# Altium footprint library FootPrintLib_10.PcbLib: 270 footprints (part 4 of 17)
Each footprint in its own frame and in the unit in brackets; x right, y up, seen from the top. Pads: shape width x height; smd on the part's side, far side on the other; paste and mask are expansions set on the pad; w line width, h text height; cw(c..) or ccw(c..) is an arc to the next point about the centre after c.
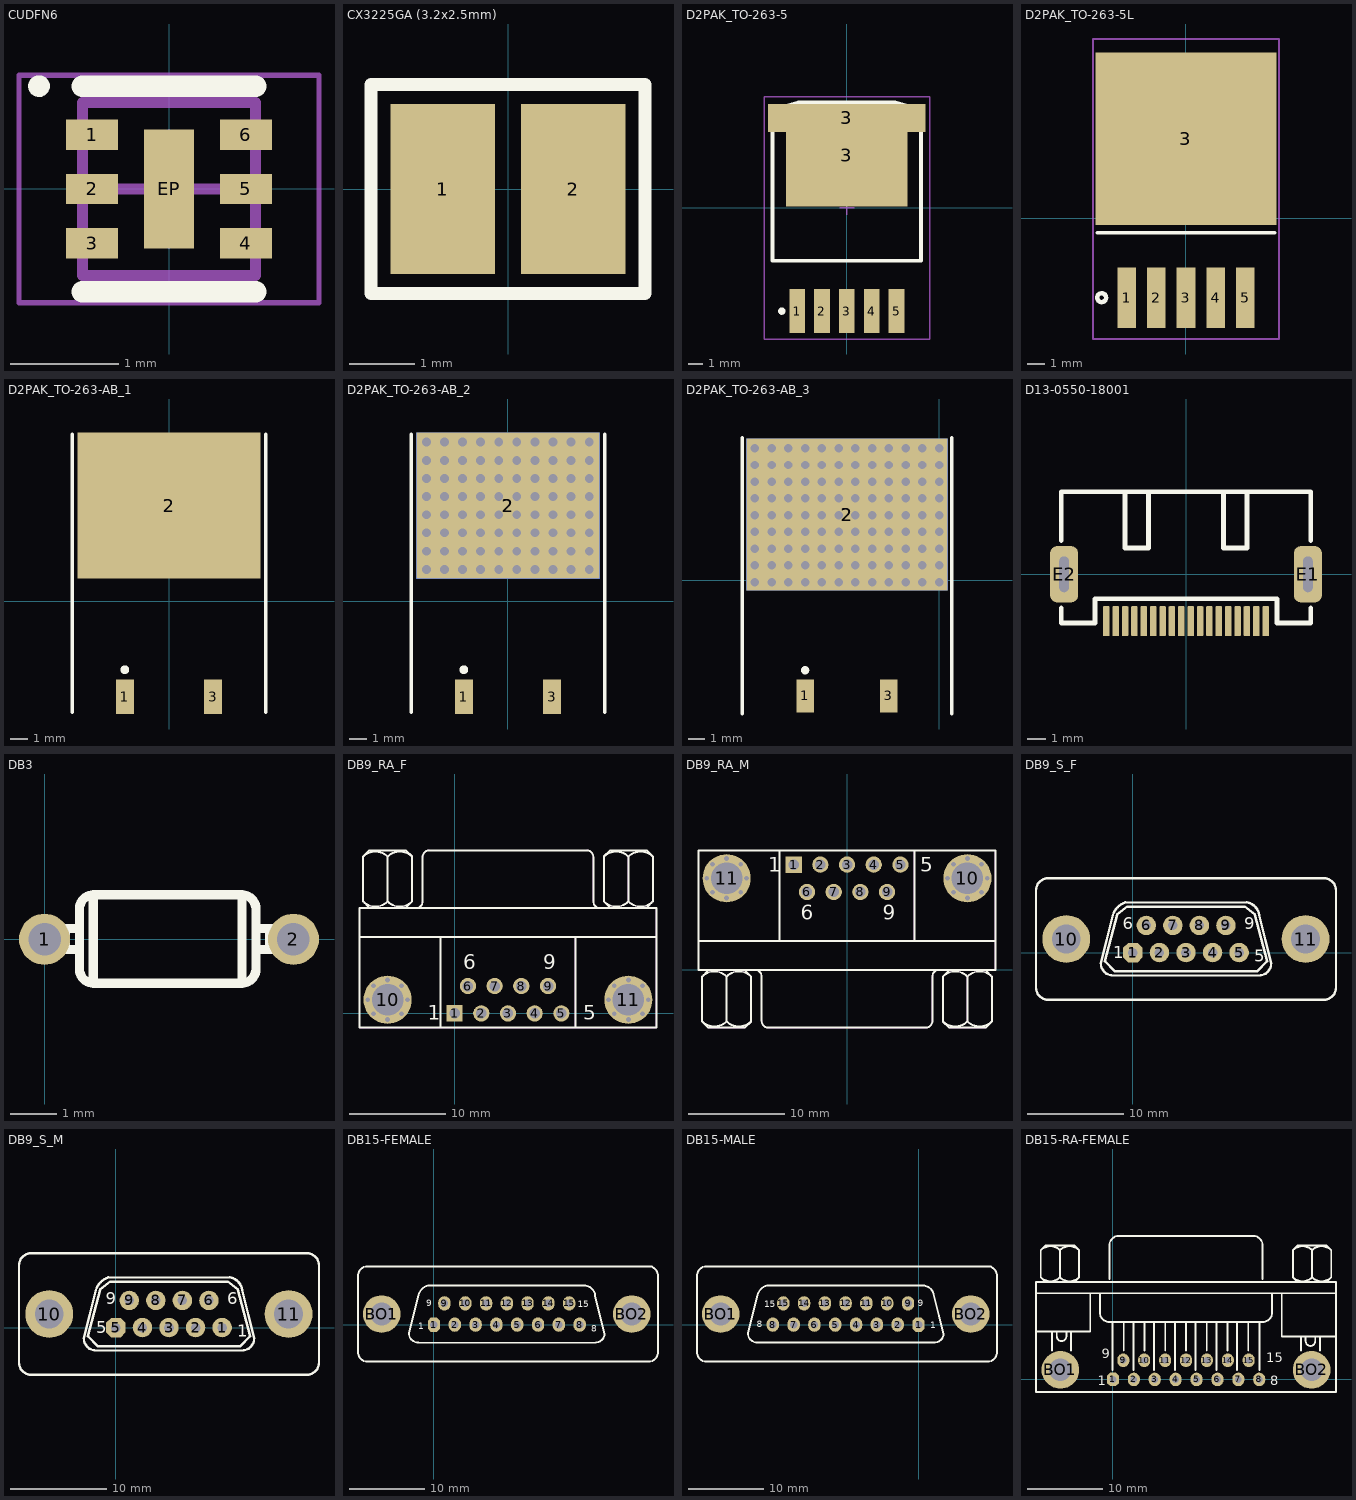
[diagram p3: the footprints below, top view; thin cyan lines are the x and y axes]

## CUDFN6 [mm] "CUDFN6, 1.6x1.6mm, 0.5P"
height 0.65
pads (7):
  rect 0.48x0.28 smd mask+0.03: 1(-0.71,0.5) 2(-0.71,0) 3(-0.71,-0.5) 4(0.71,-0.5) 5(0.71,0) 6(0.71,0.5)
  rect 0.46x1.1 smd: EP(0,0)
Top Overlay:
  circle w0.1: c-1.2,0.95 r0.05
  lines w0.2: -0.8,-0.95 0.8,-0.95 ; -0.8,0.95 0.8,0.95
Mechanical 13:
  lines w0.1: -0.8,-0.8 0.8,-0.8 0.8,0.8 -0.8,0.8 -0.8,-0.8
Mechanical 15:
  lines w0.05: -1.385,-1.05 1.385,-1.05 1.385,1.05 -1.385,1.05 -1.385,-1.05
  lines w0.1: -0.5,0 0.5,0 ; 0,-0.5 0,0.5
3D body: height 0.65, standoff 0, extent -0.8,-0.8 0.8,0.8

## CX3225GA (3.2x2.5mm) [mm]
height 0.85
pads (2):
  rect 1.6x2.6 smd: 1(-1,0) 2(1,0)
Top Overlay:
  lines w0.2: -2.1,-1.6 2.1,-1.6 2.1,1.6 -2.1,1.6 -2.1,-1.6
3D body "User Library-SG310.STEP": height 1.05, standoff 0, extent -1.6,-1.255 1.6,1.245

## D2PAK_TO-263-5 [mm] "D2-PAK, 6-Pads, Body 7.5x10.2mm (max), IPC Medium Density"
height 4.57
pads (7):
  rect 1.07x3 smd: 1(-3.4,-7.085) 2(-1.7,-7.085) 3(0,-7.085) 4(1.7,-7.085) 5(3.4,-7.085)
  rect 10.8x1.91 smd: 3(0,6.135)
  rect 8.33x7 smd: 3(0,3.59)
Top Overlay:
  circle w0.25: c-4.45,-7.085 r0.125
  lines w0.254: -5.08,-3.632 5.08,-3.632 5.08,6.675 3.303,7.214 -3.303,7.214 -5.08,6.675 -5.08,-3.632
Mechanical 15:
  lines w0.1: -0.5,0 0.5,0 ; 0,-0.5 0,0.5 ; -5.639,-8.992 -5.639,7.569 5.664,7.569 5.664,-8.992 -5.639,-8.992
3D body "SW3dPS-TO263-5.STEP": height 4.78, standoff -0.02, extent -4.971,-8.482 5.029,7.188

## D2PAK_TO-263-5L [mm] "D2-PAK, 6-Pads, Body 7.5x10.2mm (max), IPC Medium Density"
height 4.5
pads (6):
  rect 1.07x3.5 smd: 1(-3.4,-4.572) 2(-1.7,-4.572) 3(0,-4.572) 4(1.7,-4.572) 5(3.4,-4.572)
  rect 10.4x9.91 smd: 3(0,4.573)
Top Overlay:
  circle w0.254: c-4.851,-4.572 r0.254
  lines w0.2: -5.1,-0.842 5.1,-0.842
Mechanical 15:
  lines w0.1: -5.35,-6.947 -5.35,10.303 5.35,10.303 5.35,-6.947 -5.35,-6.947
3D body "SW3dPS-TO263-5.STEP": height 4.78, standoff -0.02, extent -4.971,-6.068 5.029,9.602

## D2PAK_TO-263-AB_1 [mm] "D2-PAK/TO-263-AB; 3 Leads (1 Cropped); Body 15.5 (inc. leads) x 10.5 mm (LxW max)"
height 4.69
pads (3):
  rect 1.05x2 smd: 1(-2.54,-5.5) 3(2.54,-5.5)
  rect 10.55x8.4 smd: 2(0,5.5)
Top Overlay:
  circle w0.25: c-2.54,-3.95 r0.125
  lines w0.2: -5.575,-6.4 -5.575,9.6 ; 5.575,-6.4 5.575,9.6
3D body "SW3dPS-DPAK.STEP": height 5.08, standoff 0.07, extent -5.08,-5.916 5.08,9.348

## D2PAK_TO-263-AB_2 [mm] "D2-PAK/TO-263-AB; 3 Leads (1 Cropped); Body 15.5 (inc. leads) x 10.5 mm (LxW max)"
height 4.69
pads (4):
  rect 1.05x2 smd: 1(-2.54,-5.5) 3(2.54,-5.5)
  rect 10.55x8.4 smd: 2(0,5.5)
  rect 10.55x8.4 smd far side: 2(0,5.5)
via -4.699,9.169 diameter 1.016 hole 0.508
via -3.657,9.169 diameter 1.016 hole 0.508
via -2.616,9.169 diameter 1.016 hole 0.508
via -1.574,9.169 diameter 1.016 hole 0.508
via -0.533,9.169 diameter 1.016 hole 0.508
via 0.508,9.169 diameter 1.016 hole 0.508
via 1.55,9.169 diameter 1.016 hole 0.508
via 2.591,9.169 diameter 1.016 hole 0.508
via 3.633,9.169 diameter 1.016 hole 0.508
via 4.674,9.169 diameter 1.016 hole 0.508
via -4.699,8.103 diameter 1.016 hole 0.508
via -3.657,8.103 diameter 1.016 hole 0.508
via -2.616,8.103 diameter 1.016 hole 0.508
via -1.574,8.103 diameter 1.016 hole 0.508
via -0.533,8.103 diameter 1.016 hole 0.508
via 0.508,8.103 diameter 1.016 hole 0.508
via 1.55,8.103 diameter 1.016 hole 0.508
via 2.591,8.103 diameter 1.016 hole 0.508
via 3.633,8.103 diameter 1.016 hole 0.508
via 4.674,8.103 diameter 1.016 hole 0.508
via -4.699,7.061 diameter 1.016 hole 0.508
via -3.657,7.061 diameter 1.016 hole 0.508
via -2.616,7.061 diameter 1.016 hole 0.508
via -1.574,7.061 diameter 1.016 hole 0.508
via -0.533,7.061 diameter 1.016 hole 0.508
via 0.508,7.061 diameter 1.016 hole 0.508
via 1.55,7.061 diameter 1.016 hole 0.508
via 2.591,7.061 diameter 1.016 hole 0.508
via 3.633,7.061 diameter 1.016 hole 0.508
via 4.674,7.061 diameter 1.016 hole 0.508
via -4.699,6.02 diameter 1.016 hole 0.508
via -3.657,6.02 diameter 1.016 hole 0.508
via -2.616,6.02 diameter 1.016 hole 0.508
via -1.574,6.02 diameter 1.016 hole 0.508
via -0.533,6.02 diameter 1.016 hole 0.508
via 0.508,6.02 diameter 1.016 hole 0.508
via 1.55,6.02 diameter 1.016 hole 0.508
via 2.591,6.02 diameter 1.016 hole 0.508
via 3.633,6.02 diameter 1.016 hole 0.508
via 4.674,6.02 diameter 1.016 hole 0.508
via -4.699,4.978 diameter 1.016 hole 0.508
via -3.657,4.978 diameter 1.016 hole 0.508
via -2.616,4.978 diameter 1.016 hole 0.508
via -1.574,4.978 diameter 1.016 hole 0.508
via -0.533,4.978 diameter 1.016 hole 0.508
via 0.508,4.978 diameter 1.016 hole 0.508
via 1.55,4.978 diameter 1.016 hole 0.508
via 2.591,4.978 diameter 1.016 hole 0.508
via 3.633,4.978 diameter 1.016 hole 0.508
via 4.674,4.978 diameter 1.016 hole 0.508
via -4.699,3.937 diameter 1.016 hole 0.508
via -3.657,3.937 diameter 1.016 hole 0.508
via -2.616,3.937 diameter 1.016 hole 0.508
via -1.574,3.937 diameter 1.016 hole 0.508
via -0.533,3.937 diameter 1.016 hole 0.508
via 0.508,3.937 diameter 1.016 hole 0.508
via 1.55,3.937 diameter 1.016 hole 0.508
via 2.591,3.937 diameter 1.016 hole 0.508
via 3.633,3.937 diameter 1.016 hole 0.508
via 4.674,3.937 diameter 1.016 hole 0.508
via -4.699,2.87 diameter 1.016 hole 0.508
via -3.657,2.87 diameter 1.016 hole 0.508
via -2.616,2.87 diameter 1.016 hole 0.508
via -1.574,2.87 diameter 1.016 hole 0.508
via -0.533,2.87 diameter 1.016 hole 0.508
via 0.508,2.87 diameter 1.016 hole 0.508
via 1.55,2.87 diameter 1.016 hole 0.508
via 2.591,2.87 diameter 1.016 hole 0.508
via 3.633,2.87 diameter 1.016 hole 0.508
via 4.674,2.87 diameter 1.016 hole 0.508
via 4.674,1.829 diameter 1.016 hole 0.508
via 3.633,1.829 diameter 1.016 hole 0.508
via 2.591,1.829 diameter 1.016 hole 0.508
via 1.55,1.829 diameter 1.016 hole 0.508
via 0.508,1.829 diameter 1.016 hole 0.508
via -0.533,1.829 diameter 1.016 hole 0.508
via -1.574,1.829 diameter 1.016 hole 0.508
via -2.616,1.829 diameter 1.016 hole 0.508
via -3.657,1.829 diameter 1.016 hole 0.508
via -4.699,1.829 diameter 1.016 hole 0.508
Top Overlay:
  circle w0.25: c-2.54,-3.95 r0.125
  lines w0.2: -5.575,-6.4 -5.575,9.6 ; 5.575,-6.4 5.575,9.6
3D body "SW3dPS-DPAK.STEP": height 5.08, standoff 0.07, extent -5.08,-5.916 5.08,9.348

## D2PAK_TO-263-AB_3 [mm] "D2-PAK/TO-263-AB; 3 Leads (1 Cropped); Body 15.5 (inc. leads) x 10.5 mm (LxW max)"
height 4.69
pads (4):
  rect 1.05x2 smd: 1(-8.128,-7.024) 3(-3.048,-7.024)
  rect 12.2x9.2 smd: 2(-5.588,3.976)
  rect 12.2x9.2 smd far side: 2(-5.588,3.976)
via -11.176,8.001 diameter 1.016 hole 0.508
via -10.16,8.001 diameter 1.016 hole 0.508
via -9.144,8.001 diameter 1.016 hole 0.508
via -8.128,8.001 diameter 1.016 hole 0.508
via -7.112,8.001 diameter 1.016 hole 0.508
via -6.096,8.001 diameter 1.016 hole 0.508
via -5.08,8.001 diameter 1.016 hole 0.508
via -4.064,8.001 diameter 1.016 hole 0.508
via -3.048,8.001 diameter 1.016 hole 0.508
via -2.032,8.001 diameter 1.016 hole 0.508
via -1.016,8.001 diameter 1.016 hole 0.508
via 0,8.001 diameter 1.016 hole 0.508
via -11.176,6.985 diameter 1.016 hole 0.508
via -10.16,6.985 diameter 1.016 hole 0.508
via -9.144,6.985 diameter 1.016 hole 0.508
via -8.128,6.985 diameter 1.016 hole 0.508
via -7.112,6.985 diameter 1.016 hole 0.508
via -6.096,6.985 diameter 1.016 hole 0.508
via -5.08,6.985 diameter 1.016 hole 0.508
via -4.064,6.985 diameter 1.016 hole 0.508
via -3.048,6.985 diameter 1.016 hole 0.508
via -2.032,6.985 diameter 1.016 hole 0.508
via -1.016,6.985 diameter 1.016 hole 0.508
via 0,6.985 diameter 1.016 hole 0.508
via -11.176,5.969 diameter 1.016 hole 0.508
via -10.16,5.969 diameter 1.016 hole 0.508
via -9.144,5.969 diameter 1.016 hole 0.508
via -8.128,5.969 diameter 1.016 hole 0.508
via -7.112,5.969 diameter 1.016 hole 0.508
via -6.096,5.969 diameter 1.016 hole 0.508
via -5.08,5.969 diameter 1.016 hole 0.508
via -4.064,5.969 diameter 1.016 hole 0.508
via -3.048,5.969 diameter 1.016 hole 0.508
via -2.032,5.969 diameter 1.016 hole 0.508
via -1.016,5.969 diameter 1.016 hole 0.508
via 0,5.969 diameter 1.016 hole 0.508
via -11.176,4.953 diameter 1.016 hole 0.508
via -10.16,4.953 diameter 1.016 hole 0.508
via -9.144,4.953 diameter 1.016 hole 0.508
via -8.128,4.953 diameter 1.016 hole 0.508
via -7.112,4.953 diameter 1.016 hole 0.508
via -6.096,4.953 diameter 1.016 hole 0.508
via -5.08,4.953 diameter 1.016 hole 0.508
via -4.064,4.953 diameter 1.016 hole 0.508
via -3.048,4.953 diameter 1.016 hole 0.508
via -2.032,4.953 diameter 1.016 hole 0.508
via -1.016,4.953 diameter 1.016 hole 0.508
via 0,4.953 diameter 1.016 hole 0.508
via -11.176,3.937 diameter 1.016 hole 0.508
via -10.16,3.937 diameter 1.016 hole 0.508
via -9.144,3.937 diameter 1.016 hole 0.508
via -8.128,3.937 diameter 1.016 hole 0.508
via -7.112,3.937 diameter 1.016 hole 0.508
via -6.096,3.937 diameter 1.016 hole 0.508
via -5.08,3.937 diameter 1.016 hole 0.508
via -4.064,3.937 diameter 1.016 hole 0.508
via -3.048,3.937 diameter 1.016 hole 0.508
via -2.032,3.937 diameter 1.016 hole 0.508
via -1.016,3.937 diameter 1.016 hole 0.508
via 0,3.937 diameter 1.016 hole 0.508
via -11.176,2.921 diameter 1.016 hole 0.508
via -10.16,2.921 diameter 1.016 hole 0.508
via -9.144,2.921 diameter 1.016 hole 0.508
via -8.128,2.921 diameter 1.016 hole 0.508
via -7.112,2.921 diameter 1.016 hole 0.508
via -6.096,2.921 diameter 1.016 hole 0.508
via -5.08,2.921 diameter 1.016 hole 0.508
via -4.064,2.921 diameter 1.016 hole 0.508
via -3.048,2.921 diameter 1.016 hole 0.508
via -2.032,2.921 diameter 1.016 hole 0.508
via -1.016,2.921 diameter 1.016 hole 0.508
via 0,2.921 diameter 1.016 hole 0.508
via -11.176,1.905 diameter 1.016 hole 0.508
via -10.16,1.905 diameter 1.016 hole 0.508
via -9.144,1.905 diameter 1.016 hole 0.508
via -8.128,1.905 diameter 1.016 hole 0.508
via -7.112,1.905 diameter 1.016 hole 0.508
via -6.096,1.905 diameter 1.016 hole 0.508
via -5.08,1.905 diameter 1.016 hole 0.508
via -4.064,1.905 diameter 1.016 hole 0.508
via -3.048,1.905 diameter 1.016 hole 0.508
via -2.032,1.905 diameter 1.016 hole 0.508
via -1.016,1.905 diameter 1.016 hole 0.508
via 0,1.905 diameter 1.016 hole 0.508
via -11.176,0.889 diameter 1.016 hole 0.508
via -10.16,0.889 diameter 1.016 hole 0.508
via -9.144,0.889 diameter 1.016 hole 0.508
via -8.128,0.889 diameter 1.016 hole 0.508
via -7.112,0.889 diameter 1.016 hole 0.508
via -6.096,0.889 diameter 1.016 hole 0.508
via -5.08,0.889 diameter 1.016 hole 0.508
via -4.064,0.889 diameter 1.016 hole 0.508
via -3.048,0.889 diameter 1.016 hole 0.508
via -2.032,0.889 diameter 1.016 hole 0.508
via -1.016,0.889 diameter 1.016 hole 0.508
via 0,0.889 diameter 1.016 hole 0.508
via 0,-0.127 diameter 1.016 hole 0.508
via -1.016,-0.127 diameter 1.016 hole 0.508
via -2.032,-0.127 diameter 1.016 hole 0.508
via -3.048,-0.127 diameter 1.016 hole 0.508
via -4.064,-0.127 diameter 1.016 hole 0.508
via -5.08,-0.127 diameter 1.016 hole 0.508
via -6.096,-0.127 diameter 1.016 hole 0.508
via -7.112,-0.127 diameter 1.016 hole 0.508
via -8.128,-0.127 diameter 1.016 hole 0.508
via -9.144,-0.127 diameter 1.016 hole 0.508
via -10.16,-0.127 diameter 1.016 hole 0.508
via -11.176,-0.127 diameter 1.016 hole 0.508
Top Overlay:
  circle w0.25: c-8.128,-5.474 r0.125
  lines w0.2: -11.938,-8.128 -11.938,8.636 ; 0.762,-8.128 0.762,8.636
3D body "SW3dPS-DPAK.STEP": height 5.08, standoff 0.07, extent -10.668,-7.44 -0.508,7.824

## D13-0550-18001 [mm] "SMT, 18 PIN, Female, Pitch 0.5mm"
height 3
pads (20):
  rrect30% 0.35x1.6 smd: 1(4.25,-2.5) 2(3.75,-2.5) 3(3.25,-2.5) 4(2.75,-2.5) 5(2.25,-2.5) 6(1.75,-2.5) 7(1.25,-2.5) 8(0.75,-2.5) 9(0.25,-2.5) 10(-0.25,-2.5) 11(-0.75,-2.5) 12(-1.25,-2.5) 13(-1.75,-2.5) 14(-2.25,-2.5) 15(-2.75,-2.5) 16(-3.25,-2.5) 17(-3.75,-2.5) 18(-4.25,-2.5)
  rrect50% 1.5x3 hole 0.5 slot 1.9 at 90 deg: E1(6.5,0) E2(-6.5,0)
Top Overlay:
  lines w0.254: -6.65,-1.8 -6.65,-2.6 -4.85,-2.6 -4.85,-1.3 4.85,-1.3 4.85,-2.6 6.65,-2.6 6.65,-1.8 ; -6.65,1.8 -6.65,4.4 6.65,4.4 6.65,1.8 ; -3.25,4.4 -3.25,1.4 -2,1.4 -2,4.4 ; 2,4.4 2,1.4 3.25,1.4 3.25,4.4

## DB3 [mm]
pads (2):
  round 1.1 hole 0.7: 1(0,0) 2(5.36,0)
Top Overlay:
  circle w0.2: c5.301,0.006 r0.225
  circle w0.2: c0.001,0.006 r0.225
  lines w0.2: 0.001,-0.219 0.751,-0.219 ; 0.001,0.231 0.751,0.231 ; 0.451,-0.219 0.451,0.231 ; 4.551,-0.219 5.301,-0.219 ; 4.551,0.231 5.301,0.231 ; 4.851,-0.219 4.851,0.231 ; 1.051,-0.944 cw(c1.051,-0.644) 0.751,-0.644 0.751,0.656 cw(c1.051,0.656) 1.051,0.956 ; 1.051,-0.944 1.051,0.956 ; 1.051,-0.944 4.251,-0.944 ; 1.051,0.956 4.251,0.956 ; 4.251,-0.944 ccw(c4.251,-0.644) 4.551,-0.644 4.551,0.656 ccw(c4.251,0.656) 4.251,0.956 ; 4.251,-0.944 4.251,0.956

## DB9_RA_F [mm] "Connector; D Subminiature; 9 Position; Right Angle; Female"
height 12.75
pads (27):
  rect 1.69x1.69 hole 1.09: 1(0,0)
  round 1.69 hole 1.09: 2(2.77,0) 3(5.54,0) 4(8.31,0) 5(11.08,0) 6(1.385,2.84) 7(4.155,2.84) 8(6.925,2.84) 9(9.695,2.84)
  round 0.8 hole 0.5: 10(-9.015,1.42) 10(-8.412,-0.037) 10(-8.412,2.877) 10(-6.955,-0.64) 10(-6.955,3.48) 10(-5.498,-0.037) 10(-5.498,2.877) 10(-4.895,1.42) 11(15.975,1.42) 11(16.578,-0.037) 11(16.578,2.877) 11(18.035,-0.64) 11(18.035,3.48) 11(19.492,-0.037) 11(19.492,2.877) 11(20.095,1.42)
  round 5 hole 3.26: 10(-6.955,1.42) 11(18.035,1.42)
Top Overlay:
  lines w0.2: -9.86,7.92 20.94,7.92 ; -9.498,16.27 -9.498,11.619 -8.863,10.984 ; -9.498,16.285 -8.863,16.92 -5.053,16.92 -4.418,16.285 ; -6.958,11.619 -6.958,16.27 ; -5.053,10.984 -4.418,11.619 -4.418,16.27 ; -4.418,15.006 -4.418,15.218 ; -4.02,10.925 ccw(c-4.02,11.62) -3.325,11.62 -3.325,16.22 ; -3.32,16.225 cw(c-2.625,16.225) -2.625,16.92 13.705,16.92 cw(c13.705,16.225) 14.4,16.225 ; -1.46,-1.48 -1.46,7.92 ; 12.54,-1.48 12.54,7.92 ; 14.405,16.22 14.405,11.62 ccw(c15.1,11.62) 15.1,10.925 ; 15.502,16.27 15.502,11.619 16.137,10.984 ; 15.502,16.285 16.137,16.92 19.947,16.92 20.582,16.285 ; 18.042,11.619 18.042,16.27 ; 19.947,10.984 20.582,11.619 20.582,16.27 ; 20.582,15.006 20.582,15.218 ; -9.86,-1.48 20.94,-1.48 20.94,10.92 -9.86,10.92 -9.86,-1.48
  lines w0.203: -9.5,11.617 ccw(c-8.228,12.889) -6.956,11.617 ; -9.498,16.27 cw(c-8.226,14.998) -6.953,16.27 ; -6.962,16.27 cw(c-5.69,14.998) -4.418,16.27 ; -6.96,11.617 ccw(c-5.688,12.889) -4.416,11.617 ; 15.5,11.617 ccw(c16.772,12.889) 18.044,11.617 ; 15.502,16.27 cw(c16.774,14.998) 18.047,16.27 ; 18.038,16.27 cw(c19.31,14.998) 20.582,16.27 ; 18.04,11.617 ccw(c19.312,12.889) 20.584,11.617
  text "6" at 0.9,4.6 h1.5
  text "9" at 9.2,4.6 h1.5
  text "5" at 13.335,-0.64 h1.5
  text "1" at -2.794,-0.64 h1.5
Mechanical 1:
  lines w0.1: -4.02,10.925 ccw(c-4.02,11.62) -3.325,11.62 ; -3.32,16.225 cw(c-2.625,16.225) -2.625,16.92 ; 13.705,16.92 cw(c13.705,16.225) 14.4,16.225 ; 14.405,11.62 ccw(c15.1,11.62) 15.1,10.925
Mechanical 13:
  lines w0.1: -9.86,7.92 20.94,7.92 ; -9.5,11.617 ccw(c-8.228,12.889) -6.956,11.617 ; -9.498,16.285 -8.863,16.92 -5.053,16.92 -4.418,16.285 ; -8.863,10.984 -9.498,11.619 -9.498,16.27 cw(c-8.226,14.998) -6.953,16.27 ; -6.962,16.27 cw(c-5.69,14.998) -4.418,16.27 -4.418,11.619 -5.053,10.984 ; -6.96,11.617 ccw(c-5.688,12.889) -4.416,11.617 ; -6.958,11.619 -6.958,16.27 ; -4.418,15.006 -4.418,15.218 ; -3.325,11.62 -3.325,16.22 ; -2.625,16.92 13.705,16.92 ; -1.46,-1.48 -1.46,7.92 ; 12.54,-1.48 12.54,7.92 ; 14.405,11.62 14.405,16.22 ; 15.5,11.617 ccw(c16.772,12.889) 18.044,11.617 ; 15.502,16.285 16.137,16.92 19.947,16.92 20.582,16.285 ; 16.137,10.984 15.502,11.619 15.502,16.27 cw(c16.774,14.998) 18.047,16.27 ; 18.038,16.27 cw(c19.31,14.998) 20.582,16.27 20.582,11.619 19.947,10.984 ; 18.04,11.617 ccw(c19.312,12.889) 20.584,11.617 ; 18.042,11.619 18.042,16.27 ; 20.582,15.006 20.582,15.218 ; -9.86,-1.48 20.94,-1.48 20.94,10.92 -9.86,10.92 -9.86,-1.48
3D body "9-PIN_DSUB-1.STEP": height 12.71, standoff -3.01, extent -9.865,-2.034 20.945,17.041

## DB9_RA_M [mm] "Connector; D Subminiature; 9 Position; Right Angle; Male"
height 12.75
pads (27):
  rect 1.69x1.69 hole 1.09: 1(-5.54,10.92)
  round 1.69 hole 1.09: 2(-2.77,10.92) 3(0,10.92) 4(2.77,10.92) 5(5.54,10.92) 6(-4.155,8.08) 7(-1.385,8.08) 8(1.385,8.08) 9(4.155,8.08)
  round 0.8 hole 0.5: 10(10.435,9.5) 10(11.038,8.043) 10(11.038,10.957) 10(12.495,7.44) 10(12.495,11.56) 10(13.952,8.043) 10(13.952,10.957) 10(14.555,9.5) 11(-14.555,9.5) 11(-13.952,8.043) 11(-13.952,10.957) 11(-12.495,7.44) 11(-12.495,11.56) 11(-11.038,8.043) 11(-11.038,10.957) 11(-10.435,9.5)
  round 5 hole 3.26: 10(12.495,9.5) 11(-12.495,9.5)
Top Overlay:
  lines w0.2: -15.4,3 15.4,3 ; -15.042,-5.365 -14.407,-6 -10.597,-6 -9.962,-5.365 ; -15.042,-5.35 -15.042,-0.699 -14.407,-0.064 ; -15.042,-4.298 -15.042,-4.086 ; -12.502,-5.35 -12.502,-0.699 ; -10.597,-0.064 -9.962,-0.699 -9.962,-5.35 ; -9.56,-0.005 cw(c-9.56,-0.7) -8.865,-0.7 -8.865,-5.3 ; -8.86,-5.305 ccw(c-8.165,-5.305) -8.165,-6 8.165,-6 ccw(c8.165,-5.305) 8.86,-5.305 ; -7,3 -7,12.4 ; 7,3 7,12.4 ; 8.865,-5.3 8.865,-0.7 cw(c9.56,-0.7) 9.56,-0.005 ; 9.958,-5.365 10.593,-6 14.403,-6 15.038,-5.365 ; 9.958,-5.35 9.958,-0.699 10.593,-0.064 ; 9.958,-4.298 9.958,-4.086 ; 12.498,-5.35 12.498,-0.699 ; 14.403,-0.064 15.038,-0.699 15.038,-5.35 ; -15.4,0 15.4,0 15.4,12.4 -15.4,12.4 -15.4,0
  lines w0.203: -15.044,-0.697 cw(c-13.772,-1.969) -12.5,-0.697 ; -15.042,-5.35 ccw(c-13.77,-4.078) -12.498,-5.35 ; -12.507,-5.35 ccw(c-11.234,-4.078) -9.962,-5.35 ; -12.504,-0.697 cw(c-11.232,-1.969) -9.96,-0.697 ; 9.956,-0.697 cw(c11.228,-1.969) 12.5,-0.697 ; 9.958,-5.35 ccw(c11.23,-4.078) 12.502,-5.35 ; 12.493,-5.35 ccw(c13.766,-4.078) 15.038,-5.35 ; 12.496,-0.697 cw(c13.768,-1.969) 15.04,-0.697
  text "9" at 3.7,5.2 h1.5
  text "5" at 7.6,10.2 h1.5
  text "1" at -8.165,10.2 h1.5
  text "6" at -4.8,5.2 h1.5
Mechanical 13:
  lines w0.1: -15.4,3 15.4,3 ; -15.044,-0.697 cw(c-13.772,-1.969) -12.5,-0.697 ; -15.042,-5.365 -14.407,-6 -10.597,-6 -9.962,-5.365 ; -15.042,-4.298 -15.042,-4.086 ; -14.407,-0.064 -15.042,-0.699 -15.042,-5.35 ccw(c-13.77,-4.078) -12.498,-5.35 ; -12.507,-5.35 ccw(c-11.234,-4.078) -9.962,-5.35 -9.962,-0.699 -10.597,-0.064 ; -12.504,-0.697 cw(c-11.232,-1.969) -9.96,-0.697 ; -12.502,-5.35 -12.502,-0.699 ; -9.56,-0.005 cw(c-9.56,-0.7) -8.865,-0.7 -8.865,-5.3 ; -8.86,-5.305 ccw(c-8.165,-5.305) -8.165,-6 8.165,-6 ccw(c8.165,-5.305) 8.86,-5.305 ; -7,3 -7,12.4 ; 7,3 7,12.4 ; 8.865,-5.3 8.865,-0.7 cw(c9.56,-0.7) 9.56,-0.005 ; 9.956,-0.697 cw(c11.228,-1.969) 12.5,-0.697 ; 9.958,-5.365 10.593,-6 14.403,-6 15.038,-5.365 ; 9.958,-4.298 9.958,-4.086 ; 10.593,-0.064 9.958,-0.699 9.958,-5.35 ccw(c11.23,-4.078) 12.502,-5.35 ; 12.493,-5.35 ccw(c13.766,-4.078) 15.038,-5.35 15.038,-0.699 14.403,-0.064 ; 12.496,-0.697 cw(c13.768,-1.969) 15.04,-0.697 ; 12.498,-5.35 12.498,-0.699 ; -15.4,0 15.4,0 15.4,12.4 -15.4,12.4 -15.4,0
3D body "9-PIN_DSUB.STEP": height 12.77, standoff -2.95, extent -15.483,-6.688 15.403,12.997

## DB9_S_F [mil] "Connector; D Subminiature; 9 Position; Straight; Female"
pads (11):
  oct 80x80 hole 39.37: 1(0,0)
  round 80 hole 39.37: 2(109.17,0) 3(218.33,0) 4(327.5,0) 5(436.67,0) 6(55,111.67) 7(164.17,111.67) 8(273.33,111.67) 9(382.5,111.67)
  round 196.85 hole 118.11: 10(-274.17,55.83) 11(710,55.83)
Top Overlay:
  lines w10: -398.33,255.83 cw(c-348.33,255.83) -348.33,305.83 785,305.83 cw(c785,255.83) 835,255.83 835,-144.17 cw(c785,-144.17) 785,-194.17 -348.33,-194.17 cw(c-348.33,-144.17) -398.33,-144.17 -398.33,264.17 ; -81.67,155.83 -131.67,-44.17 ccw(c-81.67,-44.17) -81.67,-94.17 518.33,-94.17 ccw(c518.33,-44.17) 568.33,-44.17 518.33,155.83 ; -78.99,163.03 cw(c-6.67,130.83) -31.13,206.12 ; -31.67,205.83 468.33,205.83 ; 468.23,206.09 cw(c460,147.5) 518.59,155.73 ; -115,-35.83 -73.33,-77.5 510,-77.5 551.67,-35.83 501.67,155.83 460,189.17 -23.33,189.17 -65,155.83 -115,-35.83
  text "9" at 458.33,95.83 h50
  text "5" at 499.33,-37.97 h50
  text "1" at -81.67,-24.17 h50
  text "6" at -41.67,95.83 h50

## DB9_S_M [mil] "Connector; D Subminiature; 9 Position; Straight; Male"
pads (11):
  round 80 hole 39.37: 1(436.67,0) 2(327.5,0) 3(218.33,0) 4(109.17,0) 6(382.5,111.67) 7(273.33,111.67) 8(164.17,111.67) 9(55,111.67)
  oct 80x80 hole 39.37: 5(0,0)
  round 196.85 hole 118.11: 10(-274.17,55.83) 11(710,55.83)
Top Overlay:
  lines w10: -398.33,255.83 cw(c-348.33,255.83) -348.33,305.83 785,305.83 cw(c785,255.83) 835,255.83 835,-144.17 cw(c785,-144.17) 785,-194.17 -348.33,-194.17 cw(c-348.33,-144.17) -398.33,-144.17 -398.33,264.17 ; -81.67,155.83 -131.67,-44.17 ccw(c-81.67,-44.17) -81.67,-94.17 518.33,-94.17 ccw(c518.33,-44.17) 568.33,-44.17 518.33,155.83 ; -78.99,163.03 cw(c-6.67,130.83) -31.13,206.12 ; -31.67,205.83 468.33,205.83 ; 468.23,206.09 cw(c460,147.5) 518.59,155.73 ; -115,-35.83 -73.33,-77.5 510,-77.5 551.67,-35.83 501.67,155.83 460,189.17 -23.33,189.17 -65,155.83 -115,-35.83
  text "6" at 458.33,95.83 h50
  text "1" at 499.33,-37.97 h50
  text "5" at -81.67,-24.17 h50
  text "9" at -41.67,95.83 h50

## DB15-FEMALE [mil]
pads (17):
  oct 65x75 hole 39.37: 1(0,0)
  oval 65x75 hole 39.37: 2(109.17,0) 3(218.33,0) 4(327.5,0) 5(436.67,0) 6(545.83,0) 7(655,0) 8(764.17,0) 9(55,111.67) 10(164.17,111.67) 11(273.33,111.67) 12(382.5,111.67) 13(490.83,111.67) 14(600,111.67) 15(709.17,111.67)
  round 196.67 hole 118.33: BO1(-274.17,55.83) BO2(1037.5,55.83)
Top Overlay:
  lines w10: -398.33,255.83 cw(c-348.33,255.83) -348.33,305.83 1144.17,305.83 ; -398.33,264.17 -398.33,-144.17 ccw(c-348.33,-144.17) -348.33,-194.17 1134.17,-194.17 ; -81.67,-94.17 cw(c-81.67,-44.17) -131.67,-44.17 -81.67,155.83 ; -80,-95 850,-95 ; -78.99,163.03 cw(c-6.67,130.83) -31.13,206.12 ; -31.67,205.83 794.17,205.83 ; 795,205 cw(c786.77,146.41) 845.36,154.64 ; 844.17,151.67 894.17,-48.33 cw(c849.5,-48.33) 849.5,-93 ; 1125,-194.17 ccw(c1125,-144.17) 1175,-144.17 1175,255.83 ccw(c1125,255.83) 1125,305.83
  text "15" at 754.17,91.67 h35
  text "8" at 824.17,-38.33 h35
  text "1" at -81.67,-24.17 h35
  text "9" at -41.67,95.83 h35

## DB15-MALE [mil]
pads (17):
  oct 65x75 hole 39.37: 1(0,0)
  oval 65x75 hole 39.37: 2(-109.17,0) 3(-218.33,0) 4(-327.5,0) 5(-436.67,0) 6(-545.83,0) 7(-655,0) 8(-764.17,0) 9(-55,111.67) 10(-164.17,111.67) 11(-273.33,111.67) 12(-382.5,111.67) 13(-490.83,111.67) 14(-600,111.67) 15(-709.17,111.67)
  round 196.67 hole 118.33: BO1(-1037.5,55.83) BO2(274.17,55.83)
Top Overlay:
  lines w10: -1161.67,255.83 cw(c-1111.67,255.83) -1111.67,305.83 380.83,305.83 ; -1161.67,264.17 -1161.67,-144.17 ccw(c-1111.67,-144.17) -1111.67,-194.17 370.83,-194.17 ; -845,-94.17 cw(c-845,-44.17) -895,-44.17 -845,155.83 ; -844.17,-93.33 85.83,-93.33 ; -842.32,163.03 cw(c-770,130.83) -794.46,206.12 ; -795,205.83 30.83,205.83 ; 29.7,204.96 cw(c21.47,146.37) 80,155 ; 79.95,155.2 130.83,-48.33 cw(c86.16,-48.33) 86.16,-93 ; 361.67,-194.17 ccw(c361.67,-144.17) 411.67,-144.17 411.67,255.83 ccw(c361.67,255.83) 361.67,305.83
  text "15" at -809.17,91.67 h35
  text "8" at -849.17,-13.33 h35
  text "1" at 60.83,-18.33 h35
  text "9" at -4.17,96.67 h35

## DB15-RA-FEMALE [mm]
pads (17):
  oct 1.6x1.8 hole 0.9: 1(-0.006,0)
  oval 1.6x1.8 hole 0.9: 2(2.767,0) 3(5.54,0) 4(8.313,0) 5(11.086,0) 6(13.858,0) 7(16.631,0) 8(19.404,0) 9(1.37,2.54) 10(4.143,2.54) 11(6.916,2.54) 12(9.689,2.54) 13(12.461,2.54) 14(15.234,2.54) 15(18.007,2.54)
  round 4.995 hole 3.006: BO1(-6.97,1.27) BO2(26.347,1.27)
Top Overlay:
  lines w0.254: -10.208,11.43 29.585,11.43 ; -9.996,6.35 -3.011,6.35 -3.011,11.43 ; -9.575,13.544 ccw(c-8.303,14.817) -7.031,13.544 ; -9.575,17.147 cw(c-8.303,15.875) -7.031,17.147 ; -8.938,12.912 -9.573,13.547 -9.573,17.145 -8.938,17.78 -5.128,17.78 -4.493,17.145 -4.493,13.547 -5.128,12.912 ; -8.091,3.81 -8.091,6.35 ; -7.456,6.35 -7.456,5.715 ccw(c-6.821,5.715) -6.186,5.715 -6.186,6.35 ; -7.035,13.544 ccw(c-5.763,14.817) -4.491,13.544 ; -7.035,17.147 cw(c-5.763,15.875) -4.491,17.147 ; -7.033,13.547 -7.033,17.145 ; -5.551,3.81 -5.551,6.35 ; -1.741,11.43 -1.741,8.89 ccw(c-0.471,8.89) -0.471,7.62 19.849,7.62 ccw(c19.849,8.89) 21.119,8.89 21.119,11.43 ; -0.471,13.335 -0.471,17.78 cw(c0.799,17.78) 0.799,19.05 18.579,19.05 cw(c18.579,17.78) 19.849,17.78 19.849,13.335 ; -0.048,1.27 -0.048,7.62 ; 1.434,3.81 1.434,7.62 ; 2.704,1.27 2.704,7.62 ; 4.185,3.81 4.185,7.62 ; 5.455,1.27 5.455,7.62 ; 6.937,3.81 6.937,7.62 ; 8.207,1.27 8.207,7.62 ; 9.689,3.81 9.689,7.62 ; 10.959,1.27 10.959,7.62 ; 12.44,3.81 12.44,7.62 ; 13.71,1.27 13.71,7.62 ; 15.192,3.81 15.192,7.62 ; 16.462,1.27 16.462,7.62 ; 17.944,3.81 17.944,7.62 ; 19.425,1.27 19.425,7.408 ; 22.389,11.43 22.389,5.715 29.374,5.715 ; 23.868,13.544 ccw(c25.14,14.817) 26.412,13.544 ; 23.868,17.147 cw(c25.14,15.875) 26.412,17.147 ; 24.505,12.912 23.87,13.547 23.87,17.145 24.505,17.78 28.315,17.78 28.95,17.145 28.95,13.547 28.315,12.912 ; 24.929,3.81 24.929,5.715 ; 25.564,5.715 25.564,5.08 ccw(c26.199,5.08) 26.834,5.08 26.834,5.715 ; 26.408,13.544 ccw(c27.68,14.817) 28.952,13.544 ; 26.408,17.147 cw(c27.68,15.875) 28.952,17.147 ; 26.41,13.547 26.41,17.145 ; 27.469,3.81 27.469,5.715 ; -10.208,-1.693 -10.208,12.912 29.585,12.912 29.585,-1.693 -10.208,-1.693
  text "8" at 20.865,-0.762 h1.27
  text "15" at 20.357,2.286 h1.27
  text "9" at -1.487,2.794 h1.27
  text "1" at -1.995,-0.762 h1.27